# Altium footprint library PBL - SMD Packages.PcbLib: 144 footprints (part 9 of 9)
Each footprint in its own frame and in the unit in brackets; x right, y up, seen from the top. Pads: shape width x height; smd on the part's side, far side on the other; paste and mask are expansions set on the pad; w line width, h text height; cw(c..) or ccw(c..) is an arc to the next point about the centre after c.
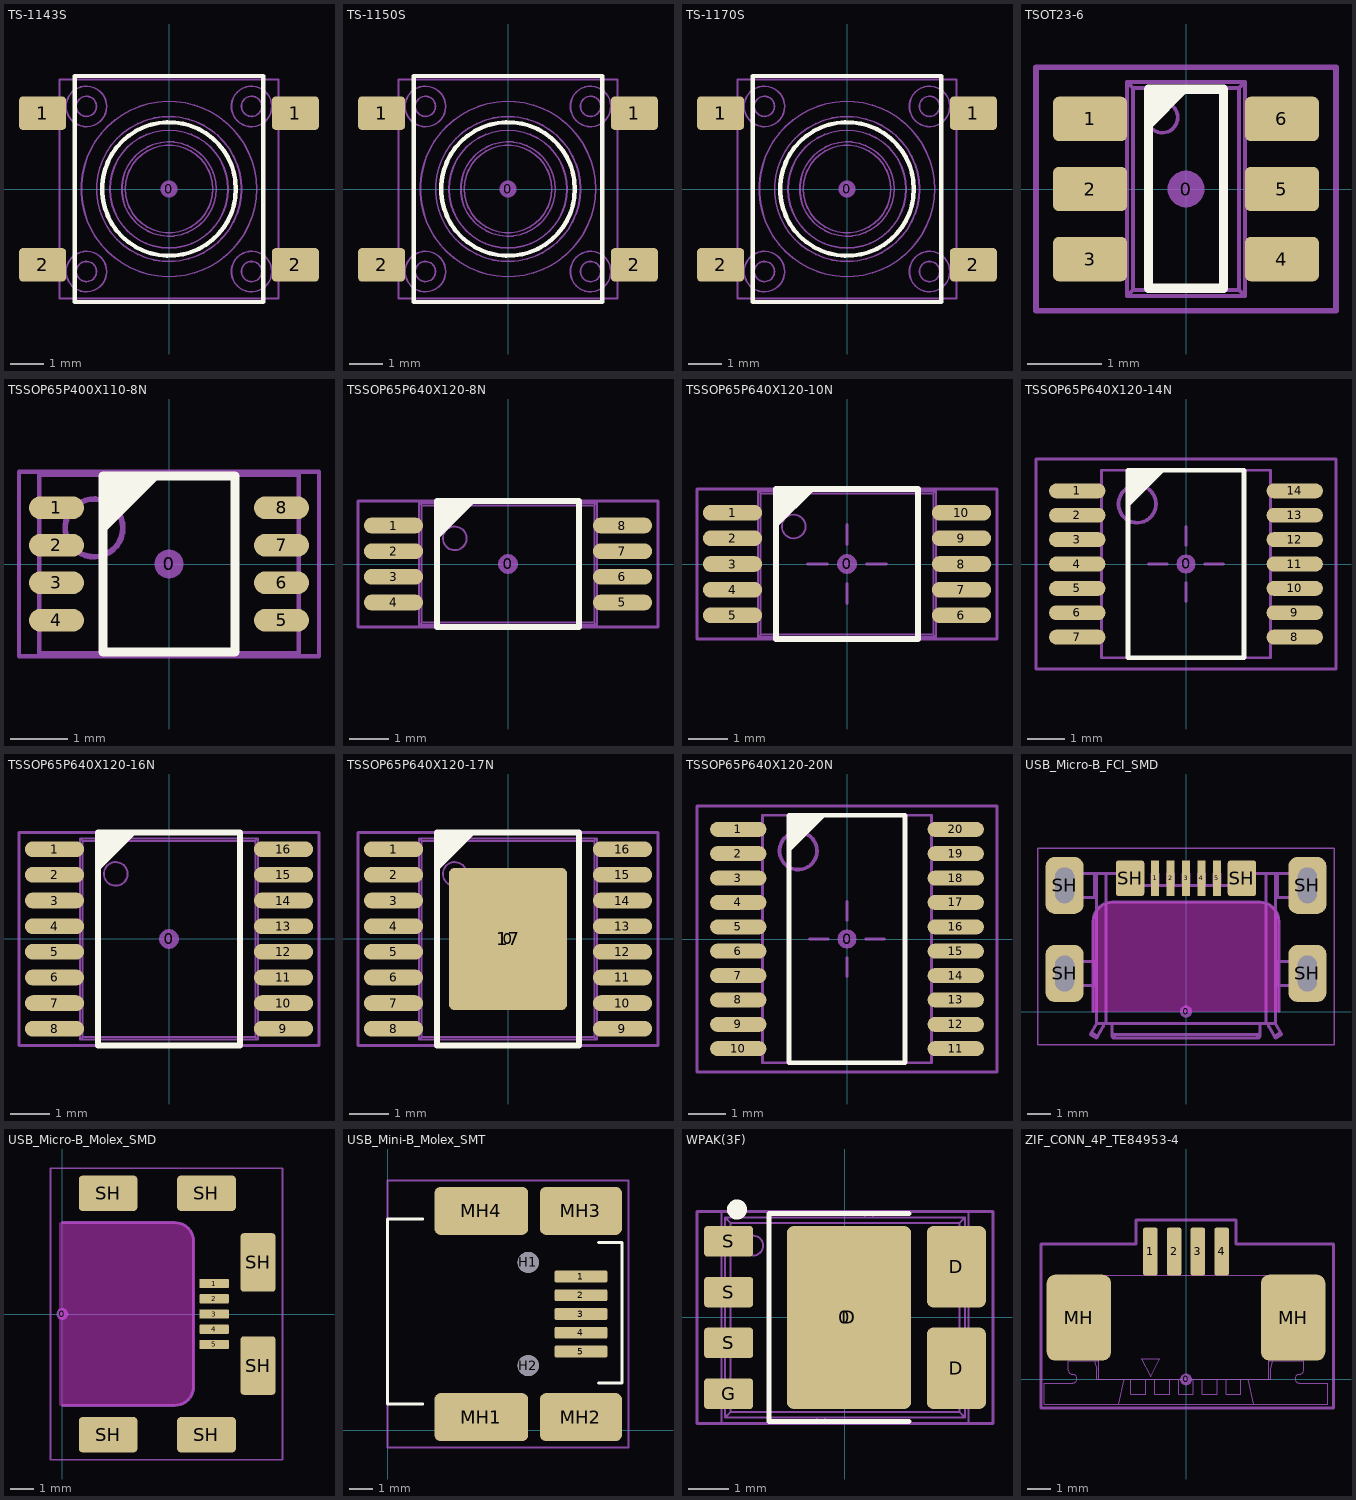
[diagram p8: the footprints below, top view; thin cyan lines are the x and y axes]

## TS-1143S [mm] "6.5x6.5mm SMD tact switch 4.3mm stem"
height 4.3
pads (5):
  round 0.508 on Mech15: 0(0,0)
  rrect25% 1.4x1 smd: 1(-3.75,2.25) 1(3.75,2.25) 2(-3.75,-2.25) 2(3.75,-2.25)
Top Overlay:
  circle w0.127: c0,0 r1.984
  lines w0.127: -2.794,-3.35 -2.794,3.35 2.794,3.35 2.794,-3.35 -2.794,-3.35
13 - 3D Top Side:
  circle w0.05: c0,0 r1.4
  circle w0.05: c0,0 r1.3
  circle w0.05: c0,-0.002 r1.75
  circle w0.05: c0,0 r2.15
  circle w0.05: c0,0 r2.6
  circle w0.05: c2.45,2.452 r0.3
  circle w0.05: c-2.45,2.452 r0.3
  circle w0.05: c2.45,-2.448 r0.3
  circle w0.05: c-2.45,-2.448 r0.3
  circle w0.05: c-2.45,2.45 r0.6
  circle w0.05: c2.45,2.45 r0.6
  circle w0.05: c2.45,-2.45 r0.6
  circle w0.05: c-2.45,-2.45 r0.6
  lines w0.05: -3.591,-2.6 -3.591,-1.9 ; -3.591,1.9 -3.591,2.6 ; -3.571,-2.6 -3.571,-1.9 ; -3.571,1.9 -3.571,2.6 ; -3.468,-2.6 -3.468,-1.9 ; -3.468,1.9 -3.468,2.6 ; -3.253,-2.6 -3.253,-1.9 ; -3.253,1.9 -3.253,2.6 ; -3.25,-2.6 -4,-2.6 -4,-1.9 -3.25,-1.9 ; -3.25,1.9 -4,1.9 -4,2.6 -3.25,2.6 ; 3.25,-2.6 4,-2.6 4,-1.9 3.25,-1.9 ; 3.25,1.9 4,1.9 4,2.6 3.25,2.6 ; 3.253,-2.6 3.253,-1.9 ; 3.253,1.9 3.253,2.6 ; 3.468,-2.6 3.468,-1.9 ; 3.468,1.9 3.468,2.6 ; 3.571,-2.6 3.571,-1.9 ; 3.571,1.9 3.571,2.6 ; 3.591,-2.6 3.591,-1.9 ; 3.591,1.9 3.591,2.6 ; -3.25,-3.25 3.25,-3.25 3.25,3.25 -3.25,3.25 -3.25,-3.25
3D body: height 4.3, standoff 0, extent -4,-3.25 4,3.25

## TS-1150S [mm] "6.5x6.5mm SMD tact switch 5.0mm stem"
height 5
pads (5):
  round 0.508 on Mech15: 0(0,0)
  rrect25% 1.4x1 smd: 1(-3.75,2.25) 1(3.75,2.25) 2(-3.75,-2.25) 2(3.75,-2.25)
Top Overlay:
  circle w0.127: c0,0 r1.984
  lines w0.127: -2.794,-3.35 -2.794,3.35 2.794,3.35 2.794,-3.35 -2.794,-3.35
13 - 3D Top Side:
  circle w0.05: c0,0 r1.4
  circle w0.05: c0,0 r1.3
  circle w0.05: c0,-0.002 r1.75
  circle w0.05: c0,0 r2.15
  circle w0.05: c0,0 r2.6
  circle w0.05: c2.45,2.452 r0.3
  circle w0.05: c-2.45,2.452 r0.3
  circle w0.05: c2.45,-2.448 r0.3
  circle w0.05: c-2.45,-2.448 r0.3
  circle w0.05: c-2.45,2.45 r0.6
  circle w0.05: c2.45,2.45 r0.6
  circle w0.05: c2.45,-2.45 r0.6
  circle w0.05: c-2.45,-2.45 r0.6
  lines w0.05: -3.591,-2.6 -3.591,-1.9 ; -3.591,1.9 -3.591,2.6 ; -3.571,-2.6 -3.571,-1.9 ; -3.571,1.9 -3.571,2.6 ; -3.468,-2.6 -3.468,-1.9 ; -3.468,1.9 -3.468,2.6 ; -3.253,-2.6 -3.253,-1.9 ; -3.253,1.9 -3.253,2.6 ; -3.25,-2.6 -4,-2.6 -4,-1.9 -3.25,-1.9 ; -3.25,1.9 -4,1.9 -4,2.6 -3.25,2.6 ; 3.25,-2.6 4,-2.6 4,-1.9 3.25,-1.9 ; 3.25,1.9 4,1.9 4,2.6 3.25,2.6 ; 3.253,-2.6 3.253,-1.9 ; 3.253,1.9 3.253,2.6 ; 3.468,-2.6 3.468,-1.9 ; 3.468,1.9 3.468,2.6 ; 3.571,-2.6 3.571,-1.9 ; 3.571,1.9 3.571,2.6 ; 3.591,-2.6 3.591,-1.9 ; 3.591,1.9 3.591,2.6 ; -3.25,-3.25 3.25,-3.25 3.25,3.25 -3.25,3.25 -3.25,-3.25
3D body: height 5, standoff 0, extent -4,-3.25 4,3.25

## TS-1170S [mm] "6.5x6.5mm SMD tact switch 7.0mm stem"
height 7
pads (5):
  round 0.508 on Mech15: 0(0,0)
  rrect25% 1.4x1 smd: 1(-3.75,2.25) 1(3.75,2.25) 2(-3.75,-2.25) 2(3.75,-2.25)
Top Overlay:
  circle w0.127: c0,0 r1.984
  lines w0.127: -2.794,-3.35 -2.794,3.35 2.794,3.35 2.794,-3.35 -2.794,-3.35
13 - 3D Top Side:
  circle w0.05: c-2.45,-2.45 r0.6
  circle w0.05: c2.45,-2.45 r0.6
  circle w0.05: c2.45,2.45 r0.6
  circle w0.05: c-2.45,2.45 r0.6
  circle w0.05: c-2.45,-2.448 r0.3
  circle w0.05: c2.45,-2.448 r0.3
  circle w0.05: c-2.45,2.452 r0.3
  circle w0.05: c2.45,2.452 r0.3
  circle w0.05: c0,0 r2.6
  circle w0.05: c0,0 r2.15
  circle w0.05: c0,-0.002 r1.75
  circle w0.05: c0,0 r1.3
  circle w0.05: c0,0 r1.4
  lines w0.05: -3.591,-2.6 -3.591,-1.9 ; -3.591,1.9 -3.591,2.6 ; -3.571,-2.6 -3.571,-1.9 ; -3.571,1.9 -3.571,2.6 ; -3.468,-2.6 -3.468,-1.9 ; -3.468,1.9 -3.468,2.6 ; -3.253,-2.6 -3.253,-1.9 ; -3.253,1.9 -3.253,2.6 ; -3.25,-2.6 -4,-2.6 -4,-1.9 -3.25,-1.9 ; -3.25,1.9 -4,1.9 -4,2.6 -3.25,2.6 ; 3.25,-2.6 4,-2.6 4,-1.9 3.25,-1.9 ; 3.25,1.9 4,1.9 4,2.6 3.25,2.6 ; 3.253,-2.6 3.253,-1.9 ; 3.253,1.9 3.253,2.6 ; 3.468,-2.6 3.468,-1.9 ; 3.468,1.9 3.468,2.6 ; 3.571,-2.6 3.571,-1.9 ; 3.571,1.9 3.571,2.6 ; 3.591,-2.6 3.591,-1.9 ; 3.591,1.9 3.591,2.6 ; -3.25,-3.25 -3.25,3.25 3.25,3.25 3.25,-3.25 -3.25,-3.25
3D body: height 7, standoff 0, extent -4,-3.25 4,3.25

## TSOT23-6 [mm] "SOT-23-6 Thin, 6 lead"
height 1
pads (7):
  round 0.5 on Mech15: 0(0,0)
  rrect25% 1x0.6 smd: 1(-1.3,0.95) 2(-1.3,0) 3(-1.3,-0.95) 4(1.3,-0.95) 5(1.3,0) 6(1.3,0.95)
Top Overlay:
  region: -0.508,1.353 0.053,1.353 -0.508,0.792
  lines w0.127: -0.508,-1.347 0.508,-1.347 0.508,1.353 -0.508,1.353 -0.508,-1.347
  text "." at -2.275,0.95 h0.1
13 - 3D Top Side:
  circle w0.05: c-0.32,0.97 r0.208
  lines w0.05: -1.191,-1.15 -1.191,-0.75 ; -1.191,-0.2 -1.191,0.2 ; -1.191,0.75 -1.191,1.15 ; -1.1,-1.15 -1.1,-0.75 ; -1.1,-0.2 -1.1,0.2 ; -1.1,0.75 -1.1,1.15 ; -1.094,-1.15 -1.094,-0.75 ; -1.094,-0.2 -1.094,0.2 ; -1.094,0.75 -1.094,1.15 ; -0.844,-1.15 -0.844,-0.75 ; -0.844,-0.2 -0.844,0.2 ; -0.844,0.75 -0.844,1.15 ; -0.8,-1.15 -1.4,-1.15 -1.4,-0.75 -0.8,-0.75 ; -0.8,-0.2 -1.4,-0.2 -1.4,0.2 -0.8,0.2 ; -0.8,0.75 -1.4,0.75 -1.4,1.15 -0.8,1.15 ; 0.8,-1.15 1.4,-1.15 1.4,-0.75 0.8,-0.75 ; 0.8,-0.2 1.4,-0.2 1.4,0.2 0.8,0.2 ; 0.8,0.75 1.4,0.75 1.4,1.15 0.8,1.15 ; 0.844,-1.15 0.844,-0.75 ; 0.844,-0.2 0.844,0.2 ; 0.844,0.75 0.844,1.15 ; 1.094,-1.15 1.094,-0.75 ; 1.094,-0.2 1.094,0.2 ; 1.094,0.75 1.094,1.15 ; 1.1,-1.15 1.1,-0.75 ; 1.1,-0.2 1.1,0.2 ; 1.1,0.75 1.1,1.15 ; 1.191,-1.15 1.191,-0.75 ; 1.191,-0.2 1.191,0.2 ; 1.191,0.75 1.191,1.15 ; -0.8,-1.45 -0.8,1.45 ; -0.8,-1.45 -0.719,-1.369 ; -0.8,-1.45 0.8,-1.45 ; -0.8,1.45 -0.719,1.369 ; -0.8,1.45 0.8,1.45 ; -0.719,-1.369 0.719,-1.369 ; -0.719,-1.369 -0.719,1.369 ; -0.719,1.369 0.719,1.369 ; 0.719,-1.369 0.8,-1.45 ; 0.719,-1.369 0.719,1.369 ; 0.719,1.369 0.8,1.45 ; 0.8,-1.45 0.8,1.45
15 - Top Courtyards:
  lines w0.076: -2.032,-1.651 2.032,-1.651 2.032,1.651 -2.032,1.651 -2.032,-1.651
3D body: height 1, standoff 0, extent -1.4,-1.45 1.4,1.45

## TSSOP65P400X110-8N [mm] "TSSOP, 8 Leads, Body 3.1x3.1mm (max), lead span 4.0mm, Pitch 0.65mm, IPC Medium Density"
height 1.1
pads (9):
  round 0.508 on Mech15: 0(0,0)
  oval 0.95x0.396 smd paste-0.051: 1(-1.95,0.975) 2(-1.95,0.325) 3(-1.95,-0.325) 4(-1.95,-0.975) 5(1.95,-0.975) 6(1.95,-0.325) 7(1.95,0.325) 8(1.95,0.975)
Top Overlay:
  region: -1.143,1.524 -0.143,1.524 -1.143,0.524
  lines w0.152: -1.143,-1.524 1.143,-1.524 1.143,1.524 -1.143,1.524 -1.143,-1.524
  text "." at -1.925,1.65 h0.1
Top Solder:
  rectangle: -2.3,-1.016 -1.6,1.016
  region: 2.3,1.016 1.6,1.016 1.6,-1.016 2.3,-1.016
13 - 3D Top Side:
  circle w0.1: c-1.3,0.625 r0.5
  lines w0.076: -2.25,-1.55 2.25,-1.55 2.25,1.55 -2.25,1.55 -2.25,-1.55
15 - Top Courtyards:
  lines w0.076: -2.6,-1.6 2.6,-1.6 2.6,1.6 -2.6,1.6 -2.6,-1.6
3D body: height 1.09, standoff -0.01, extent -2.05,-1.55 2.05,1.55

## TSSOP65P640X120-8N [mm] "TSSOP, 8 Leads, Body 3.1x4.5mm (max), Pitch 0.65mm, IPC Medium Density"
height 1.2
pads (9):
  round 0.508 on Mech15: 0(0,0)
  oval 1.5x0.4 smd paste-0.051: 1(-2.9,0.975) 2(-2.9,0.325) 3(-2.9,-0.325) 4(-2.9,-0.975) 5(2.9,-0.975) 6(2.9,-0.325) 7(2.9,0.325) 8(2.9,0.975)
Top Overlay:
  region: -1.8,1.6 -0.8,1.6 -1.8,0.6
  lines w0.152: -1.8,-1.6 -1.8,1.6 1.8,1.6 1.8,-1.6 -1.8,-1.6
  text "." at -2.85,1.7 h0.1
Top Solder:
  rectangle: -3.5,-1.016 -2.3,1.016
  region: 3.5,1.016 2.3,1.016 2.3,-1.016 3.5,-1.016
13 - 3D Top Side:
  circle w0.05: c-1.35,0.65 r0.3
  lines w0.05: -2.839,-1.125 -2.839,-0.825 ; -2.839,-0.475 -2.839,-0.175 ; -2.839,0.175 -2.839,0.475 ; -2.839,0.825 -2.839,1.125 ; -2.795,-1.125 -2.795,-0.825 ; -2.795,-0.475 -2.795,-0.175 ; -2.795,0.175 -2.795,0.475 ; -2.795,0.825 -2.795,1.125 ; -2.693,-1.125 -2.693,-0.825 ; -2.693,-0.475 -2.693,-0.175 ; -2.693,0.175 -2.693,0.475 ; -2.693,0.825 -2.693,1.125 ; -2.5,-1.125 -2.5,-0.825 ; -2.5,-0.475 -2.5,-0.175 ; -2.5,0.175 -2.5,0.475 ; -2.5,0.825 -2.5,1.125 ; -2.25,-1.125 -3.25,-1.125 -3.25,-0.825 -2.25,-0.825 ; -2.25,-0.475 -3.25,-0.475 -3.25,-0.175 -2.25,-0.175 ; -2.25,0.175 -3.25,0.175 -3.25,0.475 -2.25,0.475 ; -2.25,0.825 -3.25,0.825 -3.25,1.125 -2.25,1.125 ; 2.25,-1.125 3.25,-1.125 3.25,-0.825 2.25,-0.825 ; 2.25,-0.475 3.25,-0.475 3.25,-0.175 2.25,-0.175 ; 2.25,0.175 3.25,0.175 3.25,0.475 2.25,0.475 ; 2.25,0.825 3.25,0.825 3.25,1.125 2.25,1.125 ; 2.5,-1.125 2.5,-0.825 ; 2.5,-0.475 2.5,-0.175 ; 2.5,0.175 2.5,0.475 ; 2.5,0.825 2.5,1.125 ; 2.693,-1.125 2.693,-0.825 ; 2.693,-0.475 2.693,-0.175 ; 2.693,0.175 2.693,0.475 ; 2.693,0.825 2.693,1.125 ; 2.795,-1.125 2.795,-0.825 ; 2.795,-0.475 2.795,-0.175 ; 2.795,0.175 2.795,0.475 ; 2.795,0.825 2.795,1.125 ; 2.839,-1.125 2.839,-0.825 ; 2.839,-0.475 2.839,-0.175 ; 2.839,0.175 2.839,0.475 ; 2.839,0.825 2.839,1.125 ; -2.25,-1.55 -2.25,1.55 ; -2.25,-1.55 -2.187,-1.487 ; -2.25,-1.55 2.25,-1.55 ; -2.25,1.55 2.25,1.55 ; -2.25,1.55 -2.187,1.487 ; -2.187,-1.487 -2.187,1.487 ; -2.187,-1.487 2.187,-1.487 ; -2.187,1.487 2.187,1.487 ; 2.187,-1.487 2.187,1.487 ; 2.187,-1.487 2.25,-1.55 ; 2.187,1.487 2.25,1.55 ; 2.25,-1.55 2.25,1.55
15 - Top Courtyards:
  lines w0.076: -3.8,-1.6 -3.8,1.6 3.8,1.6 3.8,-1.6 -3.8,-1.6
3D body: height 1.19, standoff -0.01, extent -3.25,-1.55 3.25,1.55

## TSSOP65P640X120-10N [mm] "TSSOP, 10 Leads, Body 3.7x4.5mm (max), Pitch 0.65mm, IPC Medium Density"
height 1.2
pads (11):
  round 0.508 on Mech15: 0(0,0)
  oval 1.5x0.4 smd paste-0.051: 1(-2.9,1.3) 2(-2.9,0.65) 3(-2.9,0) 4(-2.9,-0.65) 5(-2.9,-1.3) 6(2.9,-1.3) 7(2.9,-0.65) 8(2.9,0) 9(2.9,0.65) 10(2.9,1.3)
Top Overlay:
  region: -1.8,1.9 -0.8,1.9 -1.8,0.9
  lines w0.152: -1.8,-1.9 -1.8,1.9 1.8,1.9 1.8,-1.9 -1.8,-1.9
  text "." at -2.85,2.025 h0.1
Top Solder:
  rectangle: -3.5,-1.3 -2.3,1.3
  region: 3.5,1.3 2.3,1.3 2.3,-1.3 3.5,-1.3
13 - 3D Top Side:
  circle w0.05: c-1.35,0.95 r0.3
  lines w0.05: -2.839,-1.45 -2.839,-1.15 ; -2.839,-0.8 -2.839,-0.5 ; -2.839,-0.15 -2.839,0.15 ; -2.839,0.5 -2.839,0.8 ; -2.839,1.15 -2.839,1.45 ; -2.795,-1.45 -2.795,-1.15 ; -2.795,-0.8 -2.795,-0.5 ; -2.795,-0.15 -2.795,0.15 ; -2.795,0.5 -2.795,0.8 ; -2.795,1.15 -2.795,1.45 ; -2.693,-1.45 -2.693,-1.15 ; -2.693,-0.8 -2.693,-0.5 ; -2.693,-0.15 -2.693,0.15 ; -2.693,0.5 -2.693,0.8 ; -2.693,1.15 -2.693,1.45 ; -2.5,-1.45 -2.5,-1.15 ; -2.5,-0.8 -2.5,-0.5 ; -2.5,-0.15 -2.5,0.15 ; -2.5,0.5 -2.5,0.8 ; -2.5,1.15 -2.5,1.45 ; -2.25,-1.45 -3.25,-1.45 -3.25,-1.15 -2.25,-1.15 ; -2.25,-0.8 -3.25,-0.8 -3.25,-0.5 -2.25,-0.5 ; -2.25,-0.15 -3.25,-0.15 -3.25,0.15 -2.25,0.15 ; -2.25,0.5 -3.25,0.5 -3.25,0.8 -2.25,0.8 ; -2.25,1.15 -3.25,1.15 -3.25,1.45 -2.25,1.45 ; 2.25,-1.45 3.25,-1.45 3.25,-1.15 2.25,-1.15 ; 2.25,-0.8 3.25,-0.8 3.25,-0.5 2.25,-0.5 ; 2.25,-0.15 3.25,-0.15 3.25,0.15 2.25,0.15 ; 2.25,0.5 3.25,0.5 3.25,0.8 2.25,0.8 ; 2.25,1.15 3.25,1.15 3.25,1.45 2.25,1.45 ; 2.5,-1.45 2.5,-1.15 ; 2.5,-0.8 2.5,-0.5 ; 2.5,-0.15 2.5,0.15 ; 2.5,0.5 2.5,0.8 ; 2.5,1.15 2.5,1.45 ; 2.693,-1.45 2.693,-1.15 ; 2.693,-0.8 2.693,-0.5 ; 2.693,-0.15 2.693,0.15 ; 2.693,0.5 2.693,0.8 ; 2.693,1.15 2.693,1.45 ; 2.795,-1.45 2.795,-1.15 ; 2.795,-0.8 2.795,-0.5 ; 2.795,-0.15 2.795,0.15 ; 2.795,0.5 2.795,0.8 ; 2.795,1.15 2.795,1.45 ; 2.839,-1.45 2.839,-1.15 ; 2.839,-0.8 2.839,-0.5 ; 2.839,-0.15 2.839,0.15 ; 2.839,0.5 2.839,0.8 ; 2.839,1.15 2.839,1.45 ; -2.25,-1.85 -2.25,1.85 ; -2.25,-1.85 -2.187,-1.787 ; -2.25,-1.85 2.25,-1.85 ; -2.25,1.85 2.25,1.85 ; -2.25,1.85 -2.187,1.787 ; -2.187,-1.787 -2.187,1.787 ; -2.187,-1.787 2.187,-1.787 ; -2.187,1.787 2.187,1.787 ; 2.187,-1.787 2.187,1.787 ; 2.187,-1.787 2.25,-1.85 ; 2.187,1.787 2.25,1.85 ; 2.25,-1.85 2.25,1.85
15 - Top Courtyards:
  lines w0.076: -1,0 -0.5,0 ; 0,-1 0,-0.5 ; 0,0.5 0,1 ; 0.5,0 1,0 ; -3.8,-1.9 -3.8,1.9 3.8,1.9 3.8,-1.9 -3.8,-1.9
3D body: height 1.2, standoff 0, extent -3.25,-1.85 3.25,1.85

## TSSOP65P640X120-14N [mm] "TSSOP, 14-Leads, Body 5.0x4.5mm (max), Pitch 0.65mm, IPC Medium Density"
height 1.2
pads (15):
  round 0.508 on Mech15: 0(0,0)
  oval 1.5x0.4 smd paste-1: 1(-2.9,1.95) 2(-2.9,1.3) 3(-2.9,0.65) 4(-2.9,0) 5(-2.9,-0.65) 6(-2.9,-1.3) 7(-2.9,-1.95) 8(2.9,-1.95) 9(2.9,-1.3) 10(2.9,-0.65) 11(2.9,0) 12(2.9,0.65) 13(2.9,1.3) 14(2.9,1.95)
Top Overlay:
  region: -1.55,2.5 -0.55,2.5 -1.55,1.5
  lines w0.127: -1.55,-2.5 1.55,-2.5 1.55,2.5 -1.55,2.5 -1.55,-2.5
  text "." at -2.9,2.725 h0.1
Top Paste:
  rectangle: -3.5,-2.1 -2.3,-1.8
  rectangle: -3.5,-1.45 -2.3,-1.15
  rectangle: -3.5,-0.8 -2.3,-0.5
  rectangle: -3.5,-0.15 -2.3,0.15
  rectangle: -3.5,0.5 -2.3,0.8
  rectangle: -3.5,1.15 -2.3,1.45
  rectangle: -3.5,1.8 -2.3,2.1
  region: 3.5,2.1 2.3,2.1 2.3,1.8 3.5,1.8
  region: 3.5,1.45 2.3,1.45 2.3,1.15 3.5,1.15
  region: 3.5,0.8 2.3,0.8 2.3,0.5 3.5,0.5
  region: 3.5,0.15 2.3,0.15 2.3,-0.15 3.5,-0.15
  region: 3.5,-0.5 2.3,-0.5 2.3,-0.8 3.5,-0.8
  region: 3.5,-1.15 2.3,-1.15 2.3,-1.45 3.5,-1.45
  region: 3.5,-1.8 2.3,-1.8 2.3,-2.1 3.5,-2.1
13 - 3D Top Side:
  circle w0.1: c-1.3,1.6 r0.5
  lines w0.076: -2.25,-2.5 2.25,-2.5 2.25,2.5 -2.25,2.5 -2.25,-2.5
15 - Top Courtyards:
  lines w0.076: -1,0 -0.5,0 ; 0,-1 0,-0.5 ; 0,0.5 0,1 ; 0.5,0 1,0 ; -4,-2.8 4,-2.8 4,2.8 -4,2.8 -4,-2.8
3D body: height 1.05, standoff 0, extent -3.205,-2.5 3.205,2.5

## TSSOP65P640X120-16N [mm] "TSSOP, 16 Leads, Body 5.1x4.5mm (max), Pitch 0.65mm, IPC Medium Density"
height 1.2
pads (17):
  round 0.508 on Mech15: 0(0,0)
  oval 1.5x0.4 smd paste-0.051: 1(-2.9,2.275) 2(-2.9,1.625) 3(-2.9,0.975) 4(-2.9,0.325) 5(-2.9,-0.325) 6(-2.9,-0.975) 7(-2.9,-1.625) 8(-2.9,-2.275) 9(2.9,-2.275) 10(2.9,-1.625) 11(2.9,-0.975) 12(2.9,-0.325) 13(2.9,0.325) 14(2.9,0.975) 15(2.9,1.625) 16(2.9,2.275)
Top Overlay:
  region: -1.8,2.7 -0.8,2.7 -1.8,1.7
  lines w0.152: -1.8,-2.7 -1.8,2.7 1.8,2.7 1.8,-2.7 -1.8,-2.7
  text "." at -2.85,3 h0.1
Top Solder:
  rectangle: -3.5,-2.4 -2.3,2.4
  region: 3.5,2.4 2.3,2.4 2.3,-2.4 3.5,-2.4
13 - 3D Top Side:
  circle w0.05: c-1.35,1.65 r0.3
  lines w0.05: -2.839,-2.425 -2.839,-2.125 ; -2.839,-1.775 -2.839,-1.475 ; -2.839,-1.125 -2.839,-0.825 ; -2.839,-0.475 -2.839,-0.175 ; -2.839,0.175 -2.839,0.475 ; -2.839,0.825 -2.839,1.125 ; -2.839,1.475 -2.839,1.775 ; -2.839,2.125 -2.839,2.425 ; -2.795,-2.425 -2.795,-2.125 ; -2.795,-1.775 -2.795,-1.475 ; -2.795,-1.125 -2.795,-0.825 ; -2.795,-0.475 -2.795,-0.175 ; -2.795,0.175 -2.795,0.475 ; -2.795,0.825 -2.795,1.125 ; -2.795,1.475 -2.795,1.775 ; -2.795,2.125 -2.795,2.425 ; -2.693,-2.425 -2.693,-2.125 ; -2.693,-1.775 -2.693,-1.475 ; -2.693,-1.125 -2.693,-0.825 ; -2.693,-0.475 -2.693,-0.175 ; -2.693,0.175 -2.693,0.475 ; -2.693,0.825 -2.693,1.125 ; -2.693,1.475 -2.693,1.775 ; -2.693,2.125 -2.693,2.425 ; -2.5,-2.425 -2.5,-2.125 ; -2.5,-1.775 -2.5,-1.475 ; -2.5,-1.125 -2.5,-0.825 ; -2.5,-0.475 -2.5,-0.175 ; -2.5,0.175 -2.5,0.475 ; -2.5,0.825 -2.5,1.125 ; -2.5,1.475 -2.5,1.775 ; -2.5,2.125 -2.5,2.425 ; -2.25,-2.425 -3.25,-2.425 -3.25,-2.125 -2.25,-2.125 ; -2.25,-1.775 -3.25,-1.775 -3.25,-1.475 -2.25,-1.475 ; -2.25,-1.125 -3.25,-1.125 -3.25,-0.825 -2.25,-0.825 ; -2.25,-0.475 -3.25,-0.475 -3.25,-0.175 -2.25,-0.175 ; -2.25,0.175 -3.25,0.175 -3.25,0.475 -2.25,0.475 ; -2.25,0.825 -3.25,0.825 -3.25,1.125 -2.25,1.125 ; -2.25,1.475 -3.25,1.475 -3.25,1.775 -2.25,1.775 ; -2.25,2.125 -3.25,2.125 -3.25,2.425 -2.25,2.425 ; 2.25,-2.425 3.25,-2.425 3.25,-2.125 2.25,-2.125 ; 2.25,-1.775 3.25,-1.775 3.25,-1.475 2.25,-1.475 ; 2.25,-1.125 3.25,-1.125 3.25,-0.825 2.25,-0.825 ; 2.25,-0.475 3.25,-0.475 3.25,-0.175 2.25,-0.175 ; 2.25,0.175 3.25,0.175 3.25,0.475 2.25,0.475 ; 2.25,0.825 3.25,0.825 3.25,1.125 2.25,1.125 ; 2.25,1.475 3.25,1.475 3.25,1.775 2.25,1.775 ; 2.25,2.125 3.25,2.125 3.25,2.425 2.25,2.425 ; 2.5,-2.425 2.5,-2.125 ; 2.5,-1.775 2.5,-1.475 ; 2.5,-1.125 2.5,-0.825 ; 2.5,-0.475 2.5,-0.175 ; 2.5,0.175 2.5,0.475 ; 2.5,0.825 2.5,1.125 ; 2.5,1.475 2.5,1.775 ; 2.5,2.125 2.5,2.425 ; 2.693,-2.425 2.693,-2.125 ; 2.693,-1.775 2.693,-1.475 ; 2.693,-1.125 2.693,-0.825 ; 2.693,-0.475 2.693,-0.175 ; 2.693,0.175 2.693,0.475 ; 2.693,0.825 2.693,1.125 ; 2.693,1.475 2.693,1.775 ; 2.693,2.125 2.693,2.425 ; 2.795,-2.425 2.795,-2.125 ; 2.795,-1.775 2.795,-1.475 ; 2.795,-1.125 2.795,-0.825 ; 2.795,-0.475 2.795,-0.175 ; 2.795,0.175 2.795,0.475 ; 2.795,0.825 2.795,1.125 ; 2.795,1.475 2.795,1.775 ; 2.795,2.125 2.795,2.425 ; 2.839,-2.425 2.839,-2.125 ; 2.839,-1.775 2.839,-1.475 ; 2.839,-1.125 2.839,-0.825 ; 2.839,-0.475 2.839,-0.175 ; 2.839,0.175 2.839,0.475 ; 2.839,0.825 2.839,1.125 ; 2.839,1.475 2.839,1.775 ; 2.839,2.125 2.839,2.425 ; -2.25,-2.55 -2.25,2.55 ; -2.25,-2.55 -2.187,-2.487 ; -2.25,-2.55 2.25,-2.55 ; -2.25,2.55 2.25,2.55 ; -2.25,2.55 -2.187,2.487 ; -2.187,-2.487 -2.187,2.487 ; -2.187,-2.487 2.187,-2.487 ; -2.187,2.487 2.187,2.487 ; 2.187,-2.487 2.187,2.487 ; 2.187,-2.487 2.25,-2.55 ; 2.187,2.487 2.25,2.55 ; 2.25,-2.55 2.25,2.55
15 - Top Courtyards:
  lines w0.076: -3.8,-2.7 -3.8,2.7 3.8,2.7 3.8,-2.7 -3.8,-2.7
3D body: height 1.2, standoff 0, extent -3.25,-2.55 3.25,2.55

## TSSOP65P640X120-17N [mm] "TSSOP, 16 Leads with exposed body pad, Body 5.1x4.5mm (max), Pitch 0.65mm, IPC Medium Density"
height 1.2
pads (18):
  round 0.508 on Mech15: 0(0,0)
  oval 1.5x0.4 smd paste-0.051: 1(-2.9,2.275) 2(-2.9,1.625) 3(-2.9,0.975) 4(-2.9,0.325) 5(-2.9,-0.325) 6(-2.9,-0.975) 7(-2.9,-1.625) 8(-2.9,-2.275) 9(2.9,-2.275) 10(2.9,-1.625) 11(2.9,-0.975) 12(2.9,-0.325) 13(2.9,0.325) 14(2.9,0.975) 15(2.9,1.625) 16(2.9,2.275)
  rrect10% 3x3.6 smd paste-0.051: 17(0,0)
Top Overlay:
  region: -1.8,2.7 -0.8,2.7 -1.8,1.7
  lines w0.152: -1.8,-2.7 1.8,-2.7 1.8,2.7 -1.8,2.7 -1.8,-2.7
  text "." at -2.85,3 h0.1
Top Solder:
  region: 3.5,2.4 2.3,2.4 2.3,-2.4 3.5,-2.4
  rectangle: -3.5,-2.4 -2.3,2.4
13 - 3D Top Side:
  circle w0.05: c-1.35,1.65 r0.3
  lines w0.05: -2.839,-2.425 -2.839,-2.125 ; -2.839,-1.775 -2.839,-1.475 ; -2.839,-1.125 -2.839,-0.825 ; -2.839,-0.475 -2.839,-0.175 ; -2.839,0.175 -2.839,0.475 ; -2.839,0.825 -2.839,1.125 ; -2.839,1.475 -2.839,1.775 ; -2.839,2.125 -2.839,2.425 ; -2.795,-2.425 -2.795,-2.125 ; -2.795,-1.775 -2.795,-1.475 ; -2.795,-1.125 -2.795,-0.825 ; -2.795,-0.475 -2.795,-0.175 ; -2.795,0.175 -2.795,0.475 ; -2.795,0.825 -2.795,1.125 ; -2.795,1.475 -2.795,1.775 ; -2.795,2.125 -2.795,2.425 ; -2.693,-2.425 -2.693,-2.125 ; -2.693,-1.775 -2.693,-1.475 ; -2.693,-1.125 -2.693,-0.825 ; -2.693,-0.475 -2.693,-0.175 ; -2.693,0.175 -2.693,0.475 ; -2.693,0.825 -2.693,1.125 ; -2.693,1.475 -2.693,1.775 ; -2.693,2.125 -2.693,2.425 ; -2.5,-2.425 -2.5,-2.125 ; -2.5,-1.775 -2.5,-1.475 ; -2.5,-1.125 -2.5,-0.825 ; -2.5,-0.475 -2.5,-0.175 ; -2.5,0.175 -2.5,0.475 ; -2.5,0.825 -2.5,1.125 ; -2.5,1.475 -2.5,1.775 ; -2.5,2.125 -2.5,2.425 ; -2.25,-2.425 -3.25,-2.425 -3.25,-2.125 -2.25,-2.125 ; -2.25,-1.775 -3.25,-1.775 -3.25,-1.475 -2.25,-1.475 ; -2.25,-1.125 -3.25,-1.125 -3.25,-0.825 -2.25,-0.825 ; -2.25,-0.475 -3.25,-0.475 -3.25,-0.175 -2.25,-0.175 ; -2.25,0.175 -3.25,0.175 -3.25,0.475 -2.25,0.475 ; -2.25,0.825 -3.25,0.825 -3.25,1.125 -2.25,1.125 ; -2.25,1.475 -3.25,1.475 -3.25,1.775 -2.25,1.775 ; -2.25,2.125 -3.25,2.125 -3.25,2.425 -2.25,2.425 ; 2.25,-2.425 3.25,-2.425 3.25,-2.125 2.25,-2.125 ; 2.25,-1.775 3.25,-1.775 3.25,-1.475 2.25,-1.475 ; 2.25,-1.125 3.25,-1.125 3.25,-0.825 2.25,-0.825 ; 2.25,-0.475 3.25,-0.475 3.25,-0.175 2.25,-0.175 ; 2.25,0.175 3.25,0.175 3.25,0.475 2.25,0.475 ; 2.25,0.825 3.25,0.825 3.25,1.125 2.25,1.125 ; 2.25,1.475 3.25,1.475 3.25,1.775 2.25,1.775 ; 2.25,2.125 3.25,2.125 3.25,2.425 2.25,2.425 ; 2.5,-2.425 2.5,-2.125 ; 2.5,-1.775 2.5,-1.475 ; 2.5,-1.125 2.5,-0.825 ; 2.5,-0.475 2.5,-0.175 ; 2.5,0.175 2.5,0.475 ; 2.5,0.825 2.5,1.125 ; 2.5,1.475 2.5,1.775 ; 2.5,2.125 2.5,2.425 ; 2.693,-2.425 2.693,-2.125 ; 2.693,-1.775 2.693,-1.475 ; 2.693,-1.125 2.693,-0.825 ; 2.693,-0.475 2.693,-0.175 ; 2.693,0.175 2.693,0.475 ; 2.693,0.825 2.693,1.125 ; 2.693,1.475 2.693,1.775 ; 2.693,2.125 2.693,2.425 ; 2.795,-2.425 2.795,-2.125 ; 2.795,-1.775 2.795,-1.475 ; 2.795,-1.125 2.795,-0.825 ; 2.795,-0.475 2.795,-0.175 ; 2.795,0.175 2.795,0.475 ; 2.795,0.825 2.795,1.125 ; 2.795,1.475 2.795,1.775 ; 2.795,2.125 2.795,2.425 ; 2.839,-2.425 2.839,-2.125 ; 2.839,-1.775 2.839,-1.475 ; 2.839,-1.125 2.839,-0.825 ; 2.839,-0.475 2.839,-0.175 ; 2.839,0.175 2.839,0.475 ; 2.839,0.825 2.839,1.125 ; 2.839,1.475 2.839,1.775 ; 2.839,2.125 2.839,2.425 ; -2.25,-2.55 2.25,-2.55 ; -2.25,-2.55 -2.187,-2.487 ; -2.25,-2.55 -2.25,2.55 ; -2.25,2.55 -2.187,2.487 ; -2.25,2.55 2.25,2.55 ; -2.187,-2.487 2.187,-2.487 ; -2.187,-2.487 -2.187,2.487 ; -2.187,2.487 2.187,2.487 ; 2.187,-2.487 2.25,-2.55 ; 2.187,-2.487 2.187,2.487 ; 2.187,2.487 2.25,2.55 ; 2.25,-2.55 2.25,2.55
15 - Top Courtyards:
  lines w0.076: -3.8,-2.7 3.8,-2.7 3.8,2.7 -3.8,2.7 -3.8,-2.7
3D body: height 1.2, standoff 0, extent -3.25,-2.55 3.25,2.55

## TSSOP65P640X120-20N [mm] "TSSOP, 20-Leads, Body 6.6x4.5mm (max), Pitch 0.65mm, IPC Medium Density"
height 1.2
pads (21):
  round 0.508 on Mech15 mask+0.127: 0(0,0)
  oval 1.5x0.4 smd paste-1 mask+0.127: 1(-2.9,2.925) 2(-2.9,2.275) 3(-2.9,1.625) 4(-2.9,0.975) 5(-2.9,0.325) 6(-2.9,-0.325) 7(-2.9,-0.975) 8(-2.9,-1.625) 9(-2.9,-2.275) 10(-2.9,-2.925) 11(2.9,-2.925) 12(2.9,-2.275) 13(2.9,-1.625) 14(2.9,-0.975) 15(2.9,-0.325) 16(2.9,0.325) 17(2.9,0.975) 18(2.9,1.625) 19(2.9,2.275) 20(2.9,2.925)
Top Overlay:
  region: -1.55,3.3 -0.55,3.3 -1.55,2.3
  lines w0.127: -1.55,-3.3 1.55,-3.3 1.55,3.3 -1.55,3.3 -1.55,-3.3
  text "." at -2.85,3.7 h0.1
Top Paste:
  region: 3.5,-2.775 2.3,-2.775 2.3,-3.075 3.5,-3.075
  region: 3.5,-2.125 2.3,-2.125 2.3,-2.425 3.5,-2.425
  region: 3.5,-1.475 2.3,-1.475 2.3,-1.775 3.5,-1.775
  rectangle: -3.5,-1.775 -2.3,-1.475
  rectangle: -3.5,-2.425 -2.3,-2.125
  rectangle: -3.5,-3.075 -2.3,-2.775
  rectangle: -3.5,-1.125 -2.3,-0.825
  rectangle: -3.5,-0.475 -2.3,-0.175
  rectangle: -3.5,0.175 -2.3,0.475
  rectangle: -3.5,0.825 -2.3,1.125
  rectangle: -3.5,1.475 -2.3,1.775
  rectangle: -3.5,2.125 -2.3,2.425
  rectangle: -3.5,2.775 -2.3,3.075
  region: 3.5,3.075 2.3,3.075 2.3,2.775 3.5,2.775
  region: 3.5,2.425 2.3,2.425 2.3,2.125 3.5,2.125
  region: 3.5,1.775 2.3,1.775 2.3,1.475 3.5,1.475
  region: 3.5,1.125 2.3,1.125 2.3,0.825 3.5,0.825
  region: 3.5,0.475 2.3,0.475 2.3,0.175 3.5,0.175
  region: 3.5,-0.175 2.3,-0.175 2.3,-0.475 3.5,-0.475
  region: 3.5,-0.825 2.3,-0.825 2.3,-1.125 3.5,-1.125
13 - 3D Top Side:
  circle w0.1: c-1.3,2.35 r0.5
  lines w0.076: -2.25,-3.3 2.25,-3.3 2.25,3.3 -2.25,3.3 -2.25,-3.3
15 - Top Courtyards:
  lines w0.076: -1,0 -0.5,0 ; 0,-1 0,-0.5 ; 0,0.5 0,1 ; 0.5,0 1,0 ; -4,-3.55 4,-3.55 4,3.55 -4,3.55 -4,-3.55
3D body: height 1.2, standoff 0, extent -3.2,-3.25 3.2,3.25

## USB_Micro-B_FCI_SMD [mm]
height 2.286
pads (12):
  round 0.508 on Mech15: 0(0,0)
  rrect20% 0.35x1.5 smd: 1(-1.3,5.6) 2(-0.65,5.6) 3(0,5.6) 4(0.65,5.6) 5(1.3,5.6)
  rrect50% 1.6x2.4 hole 0.8 slot 1.5 at 90 deg: SH(-5.1,1.6) SH(-5.1,5.3) SH(5.1,1.6) SH(5.1,5.3)
  rrect20% 1.2x1.5 smd: SH(-2.35,5.6) SH(2.35,5.6)
Top Solder:
  region: 1.905,4.826 1.905,6.35 -1.905,6.35 -1.905,4.826
Keep-Out Layer:
  board cut-out: -3.9,0 -3.907,3.797 -3.879,4.005 -3.799,4.2 -3.671,4.367 -3.503,4.495 -3.309,4.576 -3.1,4.603 -3.1,4.597 3.1,4.603 3.309,4.576 3.503,4.495 3.671,4.367 3.799,4.2 3.879,4.005 3.907,3.797 3.9,3.797 3.9,0
13 - 3D Top Side:
  lines w0.127: -4.85,1.1 -4.85,2.1 ; -4.85,4.8 -4.85,5.8 ; -3.97,-0.881 -3.71,-1.031 ; -3.85,1.1 -3.85,2.1 ; -3.85,4.8 -3.85,5.8 ; -3.75,1.1 -5.25,1.1 -5.25,2.1 -3.75,2.1 ; -3.75,4.8 -5.25,4.8 -5.25,5.8 -2.577,5.8 cw(c-2.577,5.6) -2.443,5.748 -2.007,5.352 ccw(c-1.873,5.5) -1.873,5.3 1.873,5.3 ccw(c1.873,5.5) 2.007,5.352 2.443,5.748 cw(c2.577,5.6) 2.577,5.8 5.25,5.8 5.25,4.8 3.75,4.8 ; -3.75,5.8 -3.75,-0.5 ; -3.45,-0.5 cw(c-3.75,-0.501) -3.49,-0.651 -3.76,-1.118 -4.02,-0.968 -3.75,-0.5 ; -3.35,-0.5 -3.35,5.8 ; -3.1,-0.881 ccw(c-3.006,-0.874) -3,-0.968 ; -2.526,5.793 -2.526,5.8 ; -2.229,5.553 ccw(c-2.275,5.8) -2.024,5.8 -1.825,5.8 -1.825,5.3 ; -1.425,5.3 -1.425,5.8 -1.175,5.8 -1.175,5.3 ; -0.775,5.3 -0.775,5.8 -0.525,5.8 -0.525,5.3 ; -0.125,5.3 -0.125,5.8 0.125,5.8 0.125,5.3 ; 0.525,5.3 0.525,5.8 0.775,5.8 0.775,5.3 ; 1.175,5.3 1.175,5.8 1.425,5.8 1.425,5.3 ; 1.825,5.3 1.825,5.8 2.024,5.8 ccw(c2.275,5.8) 2.229,5.553 ; 2.526,5.793 2.526,5.8 ; 3.1,-0.881 cw(c3.006,-0.874) 3,-0.968 ; 3.35,-0.5 3.35,5.8 ; 3.45,-0.5 ccw(c3.75,-0.501) 3.49,-0.651 3.76,-1.118 4.02,-0.968 3.75,-0.5 ; 3.71,-1.031 3.97,-0.881 ; 3.75,1.1 5.25,1.1 5.25,2.1 3.75,2.1 ; 3.75,5.8 3.75,-0.5 ; 3.85,1.1 3.85,2.1 ; 3.85,4.8 3.85,5.8 ; 4.85,1.1 4.85,2.1 ; 4.85,4.8 4.85,5.8 ; -3.75,-0.5 -3.1,-0.5 ; -3.1,-0.5 3.1,-0.501 ; -3.1,-0.5 -3.1,-1.031 ccw(c-3.006,-1.024) -3,-1.118 ; -3,-1.118 3,-1.118 ; -3,-1.118 -3,-0.968 ; -3,-0.968 3,-0.968 ; 3,-1.118 ccw(c3.006,-1.024) 3.1,-1.031 3.1,-0.5 ; 3,-1.118 3,-0.968 ; 3.1,-0.5 3.75,-0.5
15 - Top Courtyards:
  lines w0.076: -6.223,-1.397 -6.223,6.858 6.223,6.858 6.223,-1.397 -6.223,-1.397
  lines w0.127: -3.9,0 -3.9,3.797 cw(c-3.1,3.797) -3.1,4.597 3.1,4.597 cw(c3.1,3.797) 3.9,3.797 3.9,0
3D body: height 2.15, standoff -0.92, extent -5.25,-1.118 5.25,5.8
3D body: height 4.67, standoff -3.53, extent -5.35,-21.579 5.35,2.921

## USB_Micro-B_Molex_SMD [mm]
height 1.2
pads (12):
  round 0.508 on Mech15: 0(0,0)
  rrect20% 1.25x0.4 smd: 1(6.475,1.3) 2(6.475,0.65) 3(6.475,0) 4(6.475,-0.65) 5(6.475,-1.3)
  rrect20% 2.5x1.5 smd: SH(1.95,-5.15) SH(1.95,5.15) SH(6.15,-5.15) SH(6.15,5.15)
  rrect20% 1.5x2.5 smd: SH(8.35,-2.2) SH(8.35,2.2)
Top Solder:
  rectangle: 5.842,-1.27 7.112,1.27
Keep-Out Layer:
  board cut-out: -0.127,3.9 4.8,3.907 5.009,3.879 5.203,3.799 5.371,3.671 5.499,3.503 5.579,3.309 5.607,3.1 5.6,3.1 5.607,-3.1 5.579,-3.309 5.499,-3.503 5.371,-3.671 5.203,-3.799 5.009,-3.879 4.8,-3.907 4.8,-3.9 -0.127,-3.9
13 - 3D Top Side:
  lines w0.127: 0,-3.9 4.8,-3.9 ccw(c4.8,-3.1) 5.6,-3.1 5.6,3.1 ccw(c4.8,3.1) 4.8,3.9 0,3.9
15 - Top Courtyards:
  lines w0.076: -0.5,-6.223 -0.5,6.223 9.398,6.223 9.398,-6.223 -0.5,-6.223
3D body: height 4.1, standoff -4.1, extent -21.007,-5.35 3.492,5.35
3D body: height 1.43, standoff -1.52, extent -0.43,-5.5 8.7,5.5

## USB_Mini-B_Molex_SMT [mm]
height 3.95
pads (11):
  rrect25% 2.25x0.5 smd: 1(8.25,6.55) 2(8.25,5.75) 3(8.25,4.95) 4(8.25,4.15) 5(8.25,3.35)
  round 0.9 hole 0.9 unplated: H1(6,7.15) H2(6,2.75)
  rrect25% 4x2.05 smd: MH1(4,0.55) MH4(4,9.35)
  rrect25% 3.5x2.05 smd: MH2(8.25,0.55) MH3(8.25,9.35)
Top Overlay:
  lines w0.127: 1.5,1.1 0,1.1 0,9 1.5,9 ; 9,2 10,2 10,8 9,8
15 - Top Courtyards:
  lines w0.076: 0,-0.75 10.275,-0.75 10.275,10.65 0,10.65 0,-0.75
3D body: height 3.95, standoff 0, extent 0,1.1 9,9

## WPAK(3F) [mm] "Footprint similar to SOIC-8, Body 5.1x6.1mm, Pitch 1.27mm, IPC Medium Density"
height 0.85
pads (8):
  round 1 on Mech15: 0(0,0)
  rrect10% 3.1x4.57 smd: D(0.1,0)
  rrect20% 1.47x2.03 smd: D(2.785,-1.27) D(2.785,1.27)
  rrect20% 1.22x0.76 smd: G(-2.91,-1.905) S(-2.91,-0.635) S(-2.91,0.635) S(-2.91,1.905)
Top Overlay:
  circle w0.25: c-2.7,2.7 r0.125
  lines w0.127: 1.6,-2.6 -1.9,-2.6 -1.9,2.6 1.6,2.6
13 - 3D Top Side:
  circle w0.05: c-2.298,1.798 r0.25
  lines w0.05: -3.09,-2.115 -3.09,-2.64 -0.7,-2.64 ; -3.09,-1.695 -3.09,-0.845 ; -3.09,-0.425 -3.09,0.425 ; -3.09,0.845 -3.09,1.695 ; -3.09,2.115 -3.09,2.64 0.5,2.64 ; -3,-2.115 -3,-2.5 ; -3,-1.695 -3,-0.845 ; -3,-0.425 -3,0.425 ; -3,0.845 -3,1.695 ; -3,2.115 -3,2.5 ; -0.7,-2.5 -3,-2.5 ; -0.5,-2.64 3.09,-2.64 3.09,-2.115 ; -0.5,-2.5 3,-2.5 ; 0.5,2.5 -3,2.5 ; 0.7,2.5 3,2.5 ; 0.7,2.64 3.09,2.64 3.09,2.115 ; 3,-2.115 3,-2.5 ; 3,-1.695 3,-0.845 ; 3,-0.425 3,0.425 ; 3,0.845 3,1.695 ; 3,2.115 3,2.5 ; 3.09,-1.695 3.09,-0.845 ; 3.09,-0.425 3.09,0.425 ; 3.09,0.845 3.09,1.695 ; -3,-2.5 -2.864,-2.364 ; -3,2.5 -2.864,2.364 ; -2.864,-2.364 2.864,-2.364 ; -2.864,-2.364 -2.864,2.364 ; -2.864,2.364 2.864,2.364 ; 2.864,-2.364 2.864,2.364 ; 2.864,-2.364 3,-2.5 ; 2.864,2.364 3,2.5 ; -3.1,-2.115 -2.998,-2.115 -2.998,-1.695 -3.1,-1.695 -3.1,-2.115 ; -3.1,-0.845 -2.998,-0.845 -2.998,-0.425 -3.1,-0.425 -3.1,-0.845 ; -3.1,0.425 -2.998,0.425 -2.998,0.845 -3.1,0.845 -3.1,0.425 ; -3.1,1.695 -2.998,1.695 -2.998,2.115 -3.1,2.115 -3.1,1.695 ; -0.7,-2.65 -0.7,-2.498 -0.5,-2.498 -0.5,-2.65 -0.7,-2.65 ; 0.5,2.498 0.5,2.65 0.7,2.65 0.7,2.498 0.5,2.498 ; 2.998,-2.115 3.1,-2.115 3.1,-1.695 2.998,-1.695 2.998,-2.115 ; 2.998,-0.845 3.1,-0.845 3.1,-0.425 2.998,-0.425 2.998,-0.845 ; 2.998,0.425 3.1,0.425 3.1,0.845 2.998,0.845 2.998,0.425 ; 2.998,1.695 3.1,1.695 3.1,2.115 2.998,2.115 2.998,1.695
15 - Top Courtyards:
  lines w0.076: -3.7,-2.65 3.7,-2.65 3.7,2.65 -3.7,2.65 -3.7,-2.65
3D body: height 0.85, standoff 0, extent -3.1,-2.65 3.1,2.65

## ZIF_CONN_4P_TE84953-4 [mm] "TE Connectivity 4-pin ZIF connector"
height 2.74
pads (7):
  round 0.5 on Mech15: 0(0,0)
  rrect25% 0.61x2 smd: 1(-1.5,5.375) 2(-0.5,5.375) 3(0.5,5.375) 4(1.5,5.375)
  rrect25% 2.7x3.6 smd: MH(-4.5,2.6) MH(4.5,2.6)
13 - 3D Top Side:
  lines w0.05: -4.56,3.1 -3.93,3.1 ; -4.56,4.37 -4.56,0.87 -3.67,0.87 -3.67,0 ; -4.28,4.37 -4.18,3.997 -4.18,3.1 ; -4.18,0.86 -4.18,0.87 ; -3.982,0.87 -3.982,0.86 -5.072,0.86 cw(c-5.072,0.96) -5.172,0.96 -5.172,1.261 cw(c-5.072,1.261) -5.072,1.361 -4.762,1.361 ccw(c-4.762,1.461) -4.662,1.461 -4.662,1.763 ccw(c-4.762,1.763) -4.762,1.863 -5.072,1.863 cw(c-5.072,1.963) -5.172,1.963 -5.172,2.264 cw(c-5.072,2.264) -5.072,2.364 -4.762,2.364 ccw(c-4.762,2.464) -4.662,2.464 -4.662,2.766 ccw(c-4.762,2.766) -4.762,2.866 -5.072,2.866 cw(c-5.072,2.966) -5.172,2.966 -5.172,3.267 cw(c-5.072,3.267) -5.072,3.367 -4.762,3.367 ccw(c-4.762,3.467) -4.662,3.467 -4.662,3.769 ccw(c-4.762,3.769) -4.762,3.869 -5.072,3.869 cw(c-5.072,3.969) -5.172,3.969 -5.172,4.27 cw(c-5.072,4.27) -5.072,4.37 5.072,4.37 cw(c5.072,4.27) 5.172,4.27 5.172,3.969 cw(c5.072,3.969) 5.072,3.869 4.762,3.869 ccw(c4.762,3.769) 4.662,3.769 4.662,3.467 ccw(c4.762,3.467) 4.762,3.367 5.072,3.367 cw(c5.072,3.267) 5.172,3.267 5.172,2.966 cw(c5.072,2.966) 5.072,2.866 4.762,2.866 ccw(c4.762,2.766) 4.662,2.766 4.662,2.464 ccw(c4.762,2.464) 4.762,2.364 5.072,2.364 cw(c5.072,2.264) 5.172,2.264 5.172,1.963 cw(c5.072,1.963) 5.072,1.863 4.762,1.863 ccw(c4.762,1.763) 4.662,1.763 4.662,1.461 ccw(c4.762,1.461) 4.762,1.361 5.072,1.361 cw(c5.072,1.261) 5.172,1.261 5.172,0.96 cw(c5.072,0.96) 5.072,0.86 4.232,0.86 4.229,0.87 ; -3.93,0.87 -3.93,3.997 -3.83,4.37 ; -3.846,0.79 -3.75,0.43 -3.75,0 3.55,0 3.55,0.43 3.646,0.79 ; -3.67,0.79 -4.94,0.79 -4.94,0.39 ccw(c-4.76,0.39) -4.76,0.21 cw(c-4.76,0.03) -4.76,-0.15 -5.96,-0.15 -5.96,-1.04 5.96,-1.04 5.96,-0.15 4.76,-0.15 cw(c4.76,0.03) 4.76,0.21 ccw(c4.76,0.39) 4.94,0.39 4.94,0.79 3.47,0.79 ; -2.82,-1.04 -2.59,0 ; -2.311,0 -2.311,-0.63 -1.691,-0.63 -1.691,0 ; -1.596,4.37 -1.596,5.51 -1.396,5.51 -1.396,4.37 ; -1.596,4.88 -1.396,4.88 ; -1.596,5.01 -1.396,5.01 ; -1.596,5.38 -1.396,5.38 ; -1.311,0 -1.311,-0.63 -0.691,-0.63 -0.691,0 ; -0.596,4.37 -0.596,5.51 -0.396,5.51 -0.396,4.37 ; -0.596,4.88 -0.396,4.88 ; -0.596,5.01 -0.396,5.01 ; -0.596,5.38 -0.396,5.38 ; -0.31,0 -0.31,-0.63 0.309,-0.63 0.309,0 ; 0.405,4.37 0.405,5.51 0.604,5.51 0.604,4.37 ; 0.405,4.88 0.604,4.88 ; 0.405,5.01 0.604,5.01 ; 0.405,5.38 0.604,5.38 ; 0.69,0 0.69,-0.63 1.309,-0.63 1.309,0 ; 1.405,4.37 1.405,5.51 1.605,5.51 1.605,4.37 ; 1.405,4.88 1.605,4.88 ; 1.405,5.01 1.605,5.01 ; 1.405,5.38 1.605,5.38 ; 1.69,0 1.69,-0.63 2.31,-0.63 2.31,0 ; 2.59,0 2.82,-1.04 ; 3.47,0 3.47,0.87 4.56,0.87 4.56,4.37 ; 3.83,0.87 3.93,1.243 3.93,4.37 ; 3.93,2.14 4.18,2.14 4.18,1.243 4.28,0.87 ; 4.18,1.92 4.56,1.92 ; -1.871,0.87 -1.111,0.87 -1.49,0.11 -1.871,0.87
15 - Top Courtyards:
  lines w0.127: -6.1,-1.2 -6.1,5.7 -2.1,5.7 -2.1,6.7 2.1,6.7 2.1,5.7 6.2,5.7 6.2,-1.2 -6.1,-1.2
3D body: height 2.58, standoff 0, extent -5.96,-1.04 5.96,5.51